# Altium footprint library Amin-Library.PcbLib: 601 footprints (part 22 of 38)
Each footprint in its own frame and in the unit in brackets; x right, y up, seen from the top. Pads: shape width x height; smd on the part's side, far side on the other; paste and mask are expansions set on the pad; w line width, h text height; cw(c..) or ccw(c..) is an arc to the next point about the centre after c.
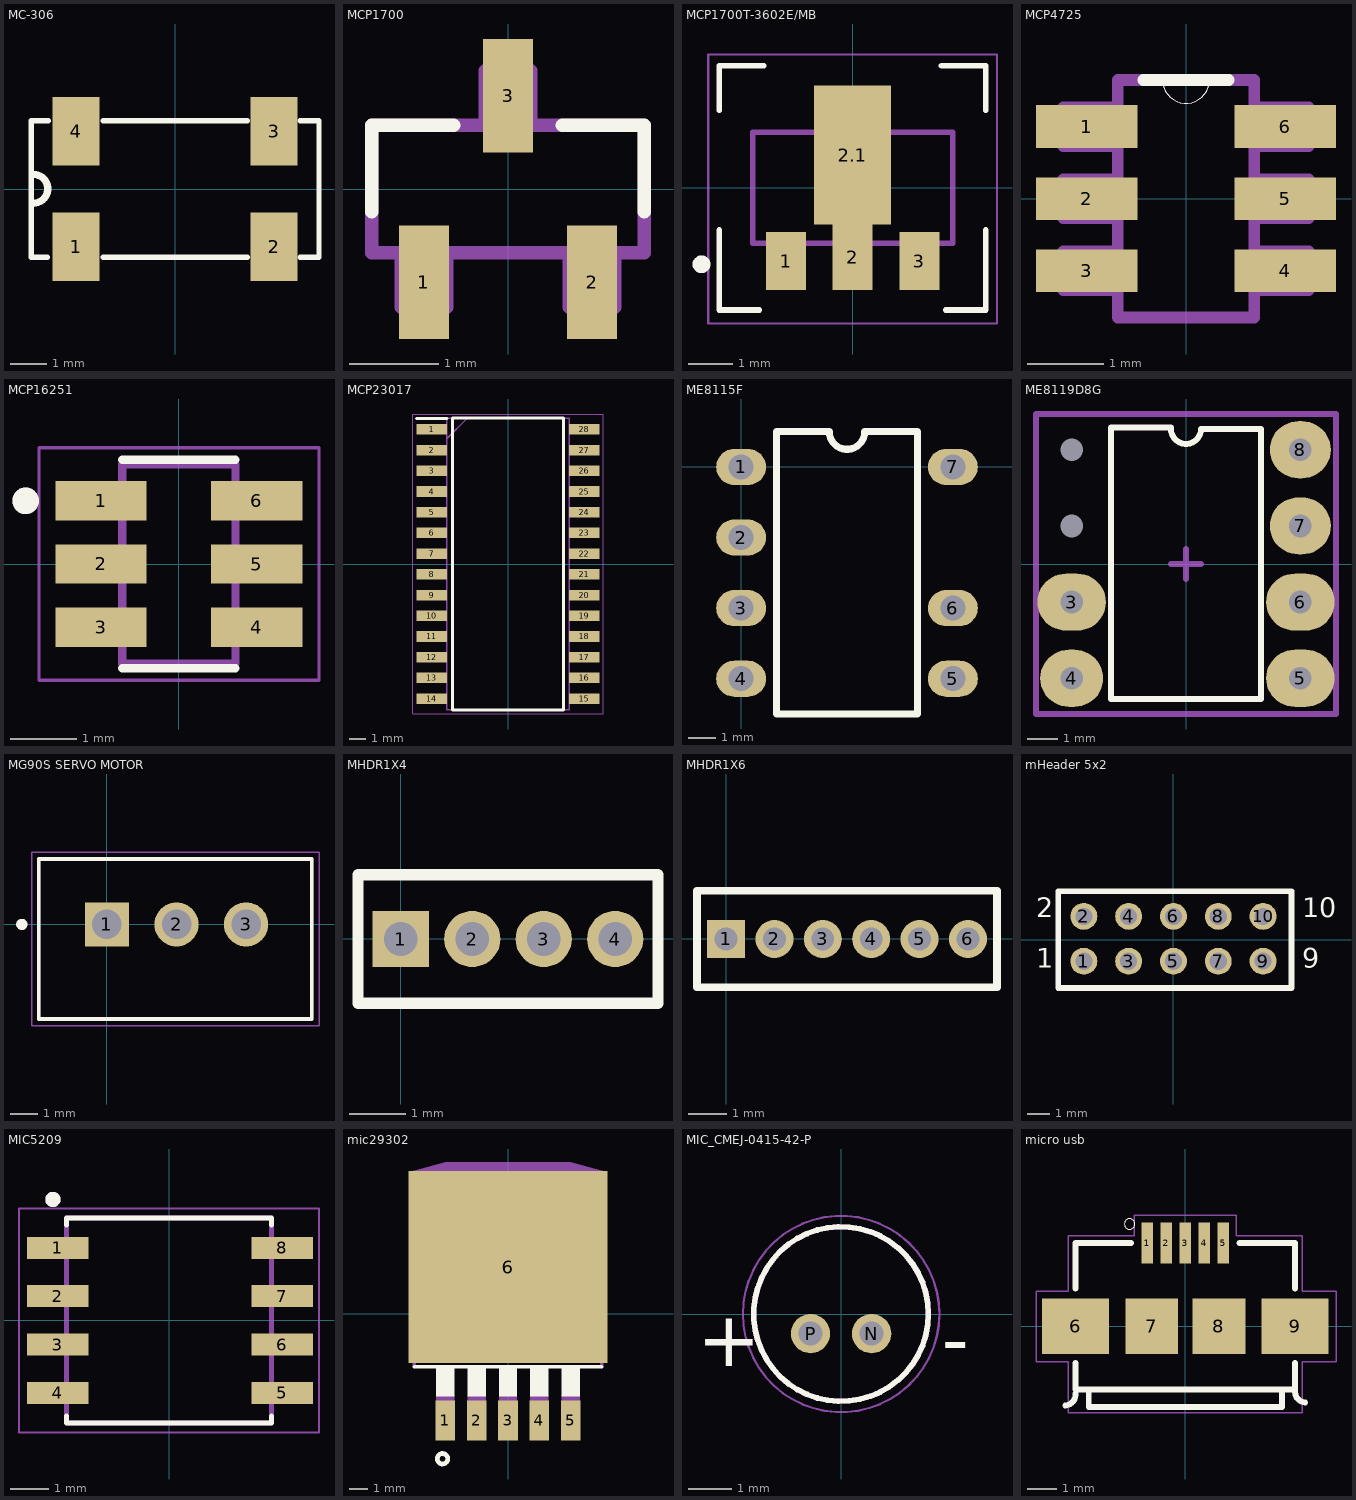
[diagram p21: the footprints below, top view; thin cyan lines are the x and y axes]

## MC-306 [mm]
height 1.6
pads (4):
  rect 1.3x1.9 smd: 1(-2.75,-1.6) 2(2.75,-1.6) 3(2.75,1.6) 4(-2.75,1.6)
Top Overlay:
  lines w0.152: -3.556,-1.9 -4,-1.9 -4,1.9 -3.531,1.9 ; -2,-1.9 2,-1.9 ; -2,1.9 2,1.9 ; 3.48,-1.9 4,-1.9 4,1.9 3.48,1.9
  lines w0.2: -3.937,-0.394 ccw(c-3.937,0.006) -3.937,0.406

## MCP1700 [mil]
pads (3):
  rect 22x50 smd: 1(-37,-41) 2(37,-41) 3(0,41)
Top Overlay:
  lines w6: -60,-10 -60,28 -24,28 ; 24,28 60,28 60,-10
Mechanical 4:
  lines w6: -60,-28 60,-28 ; -60,-28 -60,28 ; -60,-28 60,-28 ; -60,-28 -60,28 ; -60,28 60,28 ; -60,28 60,28 ; -47,-52 -47,-28 ; -47,-52 -27,-52 ; -47,-52 -47,-28 ; -47,-52 -27,-52 ; -47,-28 -27,-28 ; -47,-28 -27,-28 ; -27,-52 -27,-28 ; -27,-52 -27,-28 ; -10,28 10,28 ; -10,28 -10,52 ; -10,28 10,28 ; -10,28 -10,52 ; -10,52 10,52 ; -10,52 10,52 ; 10,28 10,52 ; 10,28 10,52 ; 27,-52 27,-28 ; 27,-52 47,-52 ; 27,-52 27,-28 ; 27,-52 47,-52 ; 27,-28 47,-28 ; 27,-28 47,-28 ; 47,-52 47,-28 ; 47,-52 47,-28 ; 60,-28 60,28 ; 60,-28 60,28
3D body "CircuitWorks-SOT-23.step": height 43.81, standoff 0.5, extent -59.06,-54.21 59.05,44.21

## MCP1700T-3602E/MB [mm]
pads (4):
  rect 0.9x1.3 smd: 1(-1.5,-1.65) 3(1.5,-1.65)
  rect 0.9x1.475 smd: 2(0,-1.562)
  rect 1.733x3.125 smd: 2.1(0,0.737)
Top Overlay:
  circle w0.2: c-3.405,-1.722 r0.1
  lines w0.127: -3,-0.95 -3,-2.75 -2.1,-2.75 ; -3,1.75 -3,2.75 -2,2.75 ; 2,2.75 3,2.75 3,1.75 ; 2.1,-2.75 3,-2.75 3,-0.95
Mechanical 4:
  lines w0.127: -2.25,-1.25 -2.25,1.25 ; -2.25,-1.25 2.25,-1.25 ; -2.25,-1.25 -2.25,1.25 ; -2.25,-1.25 2.25,-1.25 ; -2.25,1.25 2.25,1.25 ; -2.25,1.25 2.25,1.25 ; 2.25,-1.25 2.25,1.25 ; 2.25,-1.25 2.25,1.25
Mechanical 16:
  lines w0.05: -3.25,-3.054 -3.25,3 3.25,3 3.25,-3.054 -3.25,-3.054
3D body "LND150N8-G--3DModel-STEP-56544.STEP": height 1.61, standoff 0.01, extent -2.25,-2.14 2.25,1.955

## MCP4725 [mil]
pads (6):
  rect 52x22 smd: 1(-51,37) 2(-51,0) 3(-51,-37) 4(51,-37) 5(51,0) 6(51,37)
Top Overlay:
  lines w0: -12,61 ccw(c0,61) 12,61
  lines w6: -22,61 -12,61 12,61 22,61
Mechanical 4:
  lines w0: -12,61 ccw(c0,61) 12,61 cw(c0,61) -12,61
  lines w6: -63,-47 -35,-47 ; -63,-47 -63,-27 ; -63,-47 -35,-47 ; -63,-47 -63,-27 ; -63,-27 -35,-27 ; -63,-27 -35,-27 ; -63,-10 -35,-10 ; -63,-10 -63,10 ; -63,-10 -35,-10 ; -63,-10 -63,10 ; -63,10 -35,10 ; -63,10 -35,10 ; -63,27 -35,27 ; -63,27 -63,47 ; -63,27 -35,27 ; -63,27 -63,47 ; -63,47 -35,47 ; -63,47 -35,47 ; -35,-61 -35,61 ; -35,-61 35,-61 ; -35,-61 -35,61 ; -35,-61 35,-61 ; -35,-47 -35,-27 ; -35,-47 -35,-27 ; -35,-10 -35,10 ; -35,-10 -35,10 ; -35,27 -35,47 ; -35,27 -35,47 ; -35,61 -12,61 ; -35,61 -12,61 ; -12,61 12,61 ; -12,61 12,61 ; 12,61 35,61 ; 12,61 35,61 ; 35,-61 35,61 ; 35,-61 35,61 ; 35,-47 63,-47 ; 35,-47 35,-27 ; 35,-47 63,-47 ; 35,-47 35,-27 ; 35,-27 63,-27 ; 35,-27 63,-27 ; 35,-10 63,-10 ; 35,-10 35,10 ; 35,-10 63,-10 ; 35,-10 35,10 ; 35,10 63,10 ; 35,10 63,10 ; 35,27 63,27 ; 35,27 35,47 ; 35,27 63,27 ; 35,27 35,47 ; 35,47 63,47 ; 35,47 63,47 ; 63,-47 63,-27 ; 63,-47 63,-27 ; 63,-10 63,10 ; 63,-10 63,10 ; 63,27 63,47 ; 63,27 63,47
3D body "User Library-SOT23-6-2.STEP": height 57.09, standoff 0, extent -55.11,-57.09 55.13,57.09

## MCP16251 [mm]
pads (6):
  rect 1.37x0.59 smd: 1(-1.17,0.95) 2(-1.17,0) 3(-1.17,-0.95) 4(1.17,-0.95) 5(1.17,0) 6(1.17,0.95)
Top Overlay:
  circle w0.2: c-2.305,0.95 r0.1
  lines w0.127: -0.85,-1.565 0.85,-1.565 ; -0.85,1.565 0.85,1.565
Mechanical 4:
  circle w0.2: c-2.305,0.95 r0.1
  circle w0.2: c-2.305,0.95 r0.1
  lines w0.127: -0.85,-1.5 -0.85,1.5 ; -0.85,-1.5 0.85,-1.5 ; -0.85,-1.5 -0.85,1.5 ; -0.85,-1.5 0.85,-1.5 ; -0.85,1.5 0.85,1.5 ; -0.85,1.5 0.85,1.5 ; 0.85,-1.5 0.85,1.5 ; 0.85,-1.5 0.85,1.5
Mechanical 16:
  lines w0.05: -2.105,-1.75 -2.105,1.75 2.105,1.75 2.105,-1.75 -2.105,-1.75
3D body "MT3608--3DModel-STEP-56544.STEP": height 1.45, standoff 0, extent -1.4,-1.45 1.4,1.45

## MCP23017 [mm]
pads (28):
  rect 1.85x0.65 smd: 1(-4.675,8.255) 2(-4.675,6.985) 3(-4.675,5.715) 4(-4.675,4.445) 5(-4.675,3.175) 6(-4.675,1.905) 7(-4.675,0.635) 8(-4.675,-0.635) 9(-4.675,-1.905) 10(-4.675,-3.175) 11(-4.675,-4.445) 12(-4.675,-5.715) 13(-4.675,-6.985) 14(-4.675,-8.255) 15(4.675,-8.255) 16(4.675,-6.985) 17(4.675,-5.715) 18(4.675,-4.445) 19(4.675,-3.175) 20(4.675,-1.905) 21(4.675,-0.635) 22(4.675,0.635) 23(4.675,1.905) 24(4.675,3.175) 25(4.675,4.445) 26(4.675,5.715) 27(4.675,6.985) 28(4.675,8.255)
Top Overlay:
  lines w0.2: -5.6,8.93 -3.75,8.93 ; -3.4,-8.95 -3.4,8.95 3.4,8.95 3.4,-8.95 -3.4,-8.95
Mechanical 13:
  lines w0.1: -3.75,7.68 -2.48,8.95 ; -3.75,-8.95 -3.75,8.95 3.75,8.95 3.75,-8.95 -3.75,-8.95
Mechanical 15:
  lines w0.05: -5.85,-9.2 -5.85,9.2 5.85,9.2 5.85,-9.2 -5.85,-9.2
3D body "MCP23017T-E_SO.stp": height 2.65, standoff 0, extent -5.15,-8.95 5.15,8.95

## ME8115F [mm]
height 1.91
pads (7):
  oval 1.8x1.3 hole 0.9: 1(0,0) 2(0,-2.54) 3(0,-5.08) 4(0,-7.62) 5(7.62,-7.62) 6(7.62,-5.08) 7(7.62,0)
Top Overlay:
  lines w0.254: 1.27,-8.89 1.27,1.27 3.175,1.27 ccw(c3.81,1.27) 4.445,1.27 6.35,1.27 6.35,-8.89 1.27,-8.89
3D body "User Library-DIP-7.step": height 4.33, standoff -3.61, extent -1.172,-8.535 8.793,0.915

## ME8119D8G [mil] "DIP8"
height 1300
pads (8):
  round 0 hole 30 paste-99999 mask+0: 1(-150,150) 2(-150,50)
  oval 90x75 hole 30 paste-99999 mask+0: 3(-150,-50) 5(150,-150) 6(150,-50)
  oval 82.68x75 hole 30 paste-99999 mask+0: 4(-150,-150)
  oval 80x75 hole 30 paste-99999 mask+0: 7(150,50) 8(150,150)
Top Overlay:
  lines w7.87: -19.68,177.17 ccw(c0,177.17) 19.68,177.17 29.53,177.17 98.43,177.17 98.43,-177.17 -98.43,-177.17 -98.43,179.13 -19.68,179.13
Mechanical 15:
  lines w7.87: -19.68,0 19.69,0 ; 0,-19.68 0,19.69 0,0 ; -196.85,-196.85 196.85,-196.85 196.85,187.01 196.85,196.85 177.17,196.85 -196.85,196.85 -196.85,-196.85
3D body "DIP-8-9.stp": height 189.37, standoff -127.95, extent -180.14,-181.1 180.14,181.1

## MG90S SERVO MOTOR [mm]
pads (3):
  rect 1.59x1.59 hole 1.06: 1(0,0)
  round 1.59 hole 1.06: 2(2.5,0) 3(5,0)
Top Overlay:
  circle w0.2: c-3.06,0 r0.1
  lines w0.127: -2.45,-3.4 7.366,-3.4 7.366,2.35 -2.45,2.35 -2.45,-3.4
Mechanical 13:
  lines w0.127: -2.45,-3.4 7.366,-3.4 7.366,2.35 -2.45,2.35 -2.45,-3.4
Mechanical 15:
  lines w0.05: -2.7,-3.65 7.62,-3.65 7.62,2.6 -2.7,2.6 -2.7,-3.65
3D body "User Library-B3B-XH.STEP": height 7, standoff -3.4, extent -2.517,-3.4 7.383,2.35
3D body "User Library-Servo_Tower_Pro_MG90S.step": height 31.5, standoff 0, extent -3.048,12.652 9.552,44.752

## MHDR1X4 [mm] "Connector; Header; 4 Position"
pads (4):
  rect 1x1 hole 0.6: 1(0,0)
  round 1 hole 0.6: 2(1.27,0) 3(2.54,0) 4(3.81,0)
Top Overlay:
  lines w0.2: -0.762,-1.143 -0.762,1.143 4.572,1.143 4.572,-1.143 -0.762,-1.143
3D body "User Library-PIN-Header-1_27_1x2.step": height 4.85, standoff -2.4, extent 1.905,-1.2 4.445,1.2
3D body "User Library-PIN-Header-1_27_1x2.step": height 4.85, standoff -2.4, extent -0.635,-1.2 1.905,1.2

## MHDR1X6 [mm] "Connector; Header; 6 Position"
pads (6):
  rect 1x1 hole 0.6: 1(0,0)
  round 1 hole 0.6: 2(1.27,0) 3(2.54,0) 4(3.81,0) 5(5.08,0) 6(6.35,0)
Top Overlay:
  lines w0.2: -0.762,-1.27 7.112,-1.27 7.112,1.27 -0.762,1.27 -0.762,-1.27
3D body "User Library-PIN-Header-1_27_1x2.step": height 4.85, standoff -2.4, extent 4.445,-1.2 6.985,1.2
3D body "User Library-PIN-Header-1_27_1x2.step": height 4.85, standoff -2.4, extent 1.905,-1.2 4.445,1.2
3D body "User Library-PIN-Header-1_27_1x2.step": height 4.85, standoff -2.4, extent -0.635,-1.2 1.905,1.2

## mHeader 5x2 [mm] "2mm pitch"
pads (10):
  round 1.2 hole 0.762: 1(-3.988,-0.965) 2(-3.988,1.035) 3(-1.988,-0.965) 4(-1.988,1.035) 5(0.012,-0.965) 6(0.012,1.035) 7(2.012,-0.965) 8(2.012,1.035) 9(4.012,-0.965) 10(4.012,1.035)
Top Overlay:
  lines w0.254: -5.131,-2.159 -5.131,1.727 -5.131,2.159 5.283,2.159 5.283,-2.159 -5.131,-2.159
  text "1" at -6.121,-1.549 h1.5
  text "2" at -6.121,0.711 h1.5
  text "9" at 5.766,-1.549 h1.5
  text "10" at 5.766,0.711 h1.5

## MIC5209 [mm]
pads (8):
  rect 1.61x0.58 smd: 1(-2.921,1.905) 2(-2.921,0.635) 3(-2.921,-0.635) 4(-2.921,-1.905) 5(2.97,-1.905) 6(2.97,-0.635) 7(2.97,0.635) 8(2.97,1.905)
Top Overlay:
  circle w0.2: c-3.048,3.175 r0.1
  lines w0.127: -2.69,-2.51 -2.69,-2.69 2.69,-2.69 2.69,-2.51 ; -2.69,2.5 -2.69,2.69 2.69,2.69 2.69,2.5
Mechanical 4:
  circle w0.2: c-3.048,3.175 r0.1
  circle w0.2: c-3.048,3.175 r0.1
  lines w0.127: -2.69,-2.69 2.69,-2.69 ; -2.69,-2.69 -2.69,2.69 ; -2.69,-2.69 2.69,-2.69 ; -2.69,-2.69 -2.69,2.69 ; -2.69,2.69 2.69,2.69 ; -2.69,2.69 2.69,2.69 ; 2.69,-2.69 2.69,2.69 ; 2.69,-2.69 2.69,2.69
Mechanical 16:
  lines w0.05: -3.937,-2.94 3.937,-2.94 3.937,2.94 -3.937,2.94 -3.937,-2.94
3D body "User Library-so8-3.STEP": height 1.7, standoff 0, extent -3,-2.45 3,2.45

## mic29302 [mil]
pads (6):
  rect 42x85 smd: 1(-134,-228) 2(-67,-228) 3(0,-228) 4(67,-228) 5(134,-228)
  rect 425.2x409.84 smd: 6(0,100)
Top Overlay:
  circle w10: c-140,-310 r11.18
  region: -153.22,-110 -115,-110 -115,-176.25 -153.22,-176.25
  region: -86.06,-110 -48,-110 -48,-176.13 -86.06,-176.13
  region: -19,-110 19,-110 19,-176.02 -19,-176.02
  region: 48.08,-110 86,-110 86,-176.3 48.08,-176.3
  region: 115.19,-110 153,-110 153,-176.3 115.19,-176.3
  lines w8: -200.55,-113.39 200.55,-113.39
Mechanical 4:
  region: -153.12,-175 -115,-175 -115,-260.2 -153.12,-260.2
  region: -86.1,-175 -48,-175 -48,-260.31 -86.1,-260.31
  region: -19.03,-175 19,-175 19,-260.36 -19.03,-260.36
  region: 48.01,-175 86,-175 86,-260.07 48.01,-260.07
  region: 115.23,-175 153,-175 153,-260.51 115.23,-260.51
  region: -201,286.1 -201,302.29 -133,320.29 133,320.29 201,302.29 201,286.1
  region: -153.12,-175 -115,-175 -115,-260.2 -153.12,-260.2
  region: -86.1,-175 -48,-175 -48,-260.31 -86.1,-260.31
  region: -19.03,-175 19,-175 19,-260.36 -19.03,-260.36
  region: 48.01,-175 86,-175 86,-260.07 48.01,-260.07
  region: 115.23,-175 153,-175 153,-260.51 115.23,-260.51
  region: -201,286.1 -201,302.29 -133,320.29 133,320.29 201,302.29 201,286.1
  lines w8: -200.98,286.1 -200.98,302.28 ; -200.98,286.1 200.98,286.1 ; -200.98,286.1 -200.98,302.28 ; -200.98,286.1 200.98,286.1 ; -200.98,302.28 -132.99,320.28 ; -200.98,302.28 -132.99,320.28 ; -200.55,282.09 -200.55,-113.39 -200.55,282.09 ; -200.55,282.09 200.55,282.09 ; -200.55,282.09 200.55,282.09 ; -132.99,320.28 132.99,320.28 ; -132.99,320.28 132.99,320.28 ; 132.99,320.28 200.98,302.28 ; 132.99,320.28 200.98,302.28 ; 200.55,282.09 200.55,-113.39 200.55,282.09 ; 200.98,286.1 200.98,302.28 ; 200.98,286.1 200.98,302.28
3D body "User Library-TO-263 5Ld.step": height 179.92, standoff -0.39, extent -199.45,-268.21 200.55,308.21

## MIC_CMEJ-0415-42-P [mm]
pads (2):
  round 0.9 hole 0.55: N(0.7,-0.45) P(-0.7,-0.45)
Top Overlay:
  circle w0.127: c0,0 r2
  text "+" at -3.3,-1.2 h1.27
  text "-" at 2.3,-1.2 h1.27
Mechanical 13:
  circle w0.127: c0,0 r2
  text "+" at -3.3,-1.2 h1.27
  text "-" at 2.3,-1.2 h1.27
Mechanical 15:
  circle w0.05: c0,0 r2.25
3D body "CUI_DEVICES_CMC-4015-40P.step": height 0.9, standoff -2.4, extent -2,-2 2,2

## micro usb [mm]
pads (9):
  rect 0.4x1.4 smd: 1(-1.3,2.85) 2(-0.65,2.85) 3(0,2.85) 4(0.65,2.85) 5(1.3,2.85)
  rect 2.3x1.9 smd: 6(-3.75,0) 9(3.75,0)
  rect 1.8x1.9 smd: 7(-1.15,0) 8(1.15,0)
Top Overlay:
  circle w0: c-1.9,3.5 r0.18
  lines w0.2: -4.099,-2.7 ccw(c-4.125,-2.325) -3.75,-2.299 ; -3.75,-1.25 -3.75,-2.15 3.75,-2.15 3.75,-1.25 ; -3.75,1.3 -3.75,2.85 -1.85,2.85 ; -3.3,-2.2 -3.3,-2.75 3.3,-2.75 3.3,-2.2 ; 1.85,2.85 3.75,2.85 3.75,1.3 ; 3.75,-2.199 ccw(c4.125,-2.225) 4.099,-2.6
Mechanical 15:
  lines w0.05: -5.1,-1.2 -5.1,1.2 -4,1.2 -4,3.1 -1.75,3.1 -1.75,3.8 1.75,3.8 1.75,3.1 4,3.1 4,1.2 5.15,1.2 5.15,-1.2 4,-1.2 4,-2.95 -4,-2.95 -4,-1.2 -5.1,-1.2
3D body "47346-0001.stp": height 2.71, standoff -0.23, extent -3.99,-2.653 3.99,2.777